# Altium footprint library KEYSTONE_5015.PcbLib: 1 footprints
Each footprint in its own frame and in the unit in brackets; x right, y up, seen from the top. Pads: shape width x height; smd on the part's side, far side on the other; paste and mask are expansions set on the pad; w line width, h text height; cw(c..) or ccw(c..) is an arc to the next point about the centre after c.
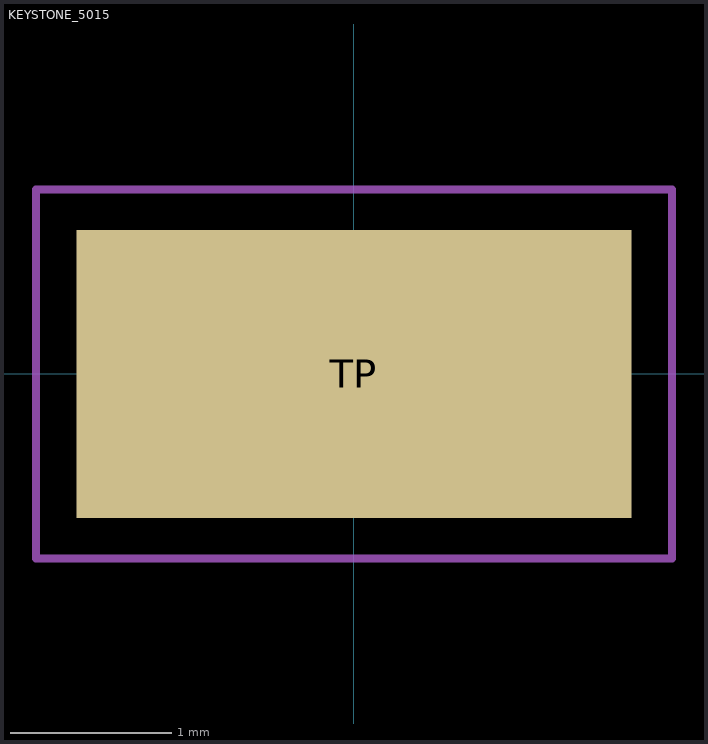
[diagram p0: the footprint, top view; thin cyan lines are the x and y axes]

## KEYSTONE_5015 [mm]
height 1.52
pads (1):
  rect 3.43x1.78 smd: TP(0,0)
Assembly Top:
  lines w0.127: -1.335,-0.51 1.335,-0.51 1.335,0.51 -1.335,0.51 -1.335,-0.51
Courtyard Top:
  lines w0.05: -1.965,-1.14 -1.965,1.14 1.965,1.14 1.965,-1.14 -1.965,-1.14
3D body "step_temp.STEP": height 1.52, standoff 0, extent -1.333,-0.508 1.333,0.508